# Altium schematic symbol library Resistor_SMD.SchLib: 23 symbols
Pins are listed as number, name and electrical type; pins without a type are passive.

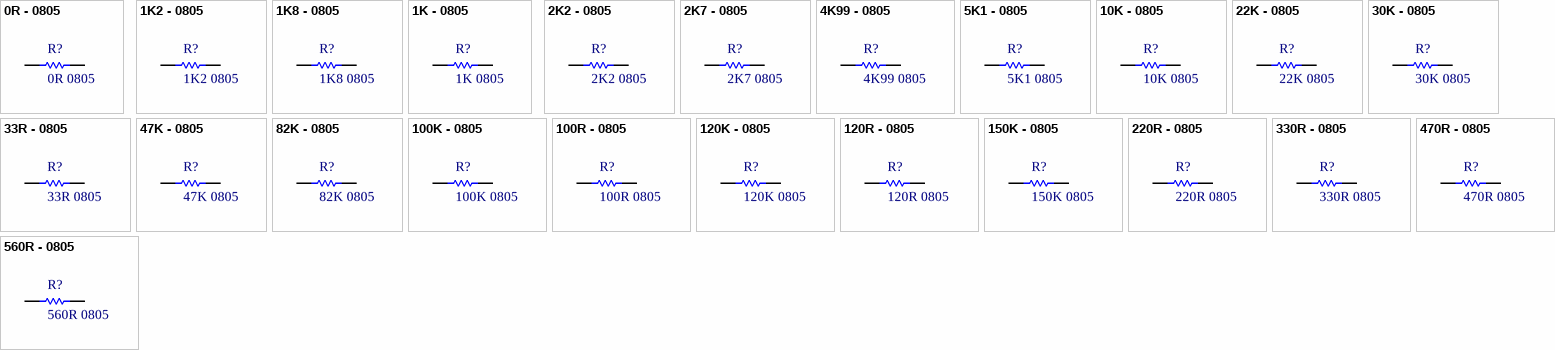
[diagram p0: symbols 0R - 0805 to 560R - 0805]

## 0R - 0805
designator R?, comment 0R 0805
Resistor SMD 0805 0R
footprint 0805 - 0R 1%
footprint 0805 - 0R 5%
pins: 1, 2

## 1K2 - 0805
designator R?, comment 1K2 0805
Resistor SMD 0805 1K2
footprint 0805 - 1K2 1%
footprint 0805 - 1K2 5%
pins: 1, 2

## 1K8 - 0805
designator R?, comment 1K8 0805
Resistor SMD 0805 1K8
footprint 0805 - 1K8 5%
footprint 0805 - 1K8 1%
pins: 1, 2

## 1K - 0805
designator R?, comment 1K 0805
Resistor SMD 0805 1K
footprint 0805 - 1K 1%
footprint 0805 - 1K 5%
pins: 1, 2

## 2K2 - 0805
designator R?, comment 2K2 0805
Resistor SMD 0805 2K2
footprint 0805 - 2k2 1%
footprint 0805 - 2k2 5%
pins: 1, 2

## 2K7 - 0805
designator R?, comment 2K7 0805
Resistor SMD 0805 2K7
footprint 0805 - 2k7 1%
footprint 0805 - 2k7 5%
pins: 1, 2

## 4K99 - 0805
designator R?, comment 4K99 0805
Resistor SMD 0805 4K99
footprint 0805 - 4k99 1%
pins: 1, 2

## 5K1 - 0805
designator R?, comment 5K1 0805
Resistor SMD 0805 5K1
footprint 0805 - 5k1 1%
pins: 1, 2

## 10K - 0805
designator R?, comment 10K 0805
Resistor SMD 0805 10K
footprint 0805 - 10k 1%
footprint 0805 - 10k 5%
pins: 1, 2

## 22K - 0805
designator R?, comment 22K 0805
Resistor SMD 0805 22K
footprint 0805 - 22k 1%
footprint 0805 - 22k 5%
pins: 1, 2

## 30K - 0805
designator R?, comment 30K 0805
Resistor SMD 0805 30K
footprint 0805 - 30k 1%
footprint 0805 - 30k 5%
pins: 1, 2

## 33R - 0805
designator R?, comment 33R 0805
Resistor SMD 0805 33R
footprint 0805 - 33R 1%
footprint 0805 - 33R 5%
pins: 1, 2

## 47K - 0805
designator R?, comment 47K 0805
Resistor SMD 0805 47K
footprint 0805 - 47k 1%
footprint 0805 - 47k 5%
pins: 1, 2

## 82K - 0805
designator R?, comment 82K 0805
Resistor SMD 0805 82K
footprint 0805 - 82k 1%
footprint 0805 - 82k 5%
pins: 1, 2

## 100K - 0805
designator R?, comment 100K 0805
Resistor SMD 0805 100K
footprint 0805 - 100k 1%
footprint 0805 - 100k 5%
pins: 1, 2

## 100R - 0805
designator R?, comment 100R 0805
Resistor SMD 0805 100R
footprint 0805 - 100R 1%
footprint 0805 - 100R 5%
pins: 1, 2

## 120K - 0805
designator R?, comment 120K 0805
Resistor SMD 0805 120K
footprint 0805 - 120K 5%
pins: 1, 2

## 120R - 0805
designator R?, comment 120R 0805
Resistor SMD 0805 120R
footprint 0805 - 120R 1%
footprint 0805 - 120R 5%
pins: 1, 2

## 150K - 0805
designator R?, comment 150K 0805
Resistor SMD 0805 150K
footprint 0805 - 150K 5%
pins: 1, 2

## 220R - 0805
designator R?, comment 220R 0805
Resistor SMD 0805 220R
footprint 0805 - 220R 1%
footprint 0805 - 220R 5%
pins: 1, 2

## 330R - 0805
designator R?, comment 330R 0805
Resistor SMD 0805 330R
footprint 0805 - 330R 1%
footprint 0805 - 330R 5%
pins: 1, 2

## 470R - 0805
designator R?, comment 470R 0805
Resistor SMD 0805 470R
footprint 0805 - 470R 1%
footprint 0805 - 470R 5%
pins: 1, 2

## 560R - 0805
designator R?, comment 560R 0805
Resistor SMD 0805 560R
footprint 0805 - 560R 5%
pins: 1, 2